# Altium footprint library Voltage_regulators.PcbLib: 4 footprints
Each footprint in its own frame and in the unit in brackets; x right, y up, seen from the top. Pads: shape width x height; smd on the part's side, far side on the other; paste and mask are expansions set on the pad; w line width, h text height; cw(c..) or ccw(c..) is an arc to the next point about the centre after c.
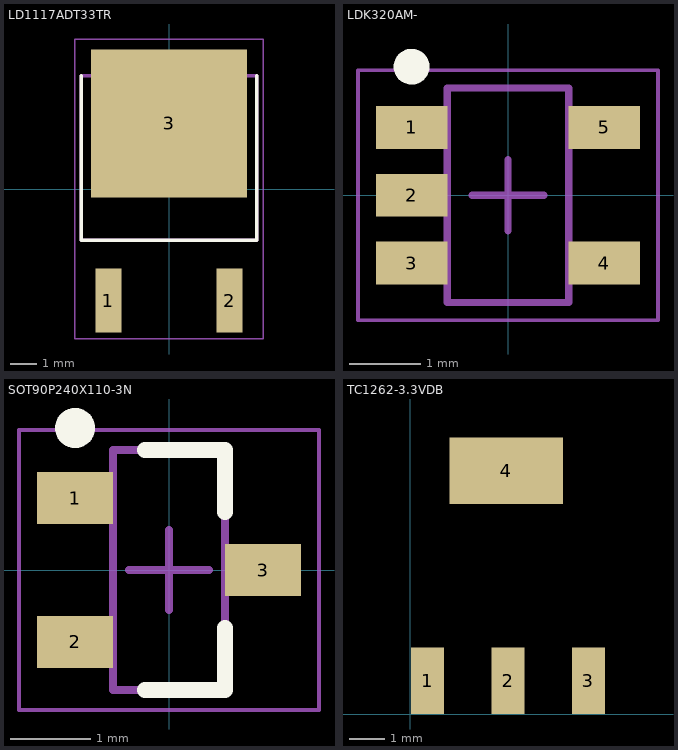
[diagram p0: the footprints below, top view; thin cyan lines are the x and y axes]

## LD1117ADT33TR [mm] "IC: voltage regulator; LDO,linear,fixed; 3.3V; 1A; DPAK; SMD; ±4%"
pads (3):
  rect 0.98x2.4 smd: 1(-2.28,-4.2) 2(2.28,-4.2)
  rect 5.86x5.57 smd paste-4: 3(0,2.47)
Top Overlay:
  lines w0.127: -3.3,4.27 -3.3,-1.93 3.3,-1.93 3.3,4.27
  text ".DESIGNATOR" at -3.602,5.857 h1
Mechanical 13:
  lines w0.127: -3.3,-1.93 3.3,-1.93 3.3,4.27 -3.3,4.27 -3.3,-1.93
Mechanical 15:
  lines w0.05: -3.55,-5.65 -3.55,5.65 3.55,5.65 3.55,-5.65 -3.55,-5.65
3D body "step_temp.STEP": height 2.17, standoff -0.23, extent -3.25,-4.743 3.25,4.982

## LDK320AM- [mm] "IC: voltage regulator; LDO,linear,adjustable; 1.2÷12V; 0.2A; SMD"
height 1.25
pads (5):
  rect 1x0.6 smd: 1(-1.35,0.95) 2(-1.35,0) 3(-1.35,-0.95) 4(1.35,-0.95) 5(1.35,0.95)
Top Overlay:
  circle w0.25: c-1.35,1.8 r0.125
  text ".DESIGNATOR" at -0.808,1.92 h1
Mechanical 13:
  lines w0.1: -0.85,-1.5 0.85,-1.5 0.85,1.5 -0.85,1.5 -0.85,-1.5
Mechanical 15:
  lines w0.05: -2.1,-1.75 2.1,-1.75 2.1,1.75 -2.1,1.75 -2.1,-1.75
  lines w0.1: -0.5,0 0.5,0 ; 0,-0.5 0,0.5
3D body "LDK320AM-.step": height 1.25, standoff 0, extent -1.6,-1.5 1.6,1.5

## SOT90P240X110-3N [mm] "SOT23, 3-Leads, Body 2,90x2,40mm, Pitch 0,90mm, IPC Medium Density"
height 1.1
pads (3):
  rect 0.95x0.65 smd: 1(-1.175,0.9) 2(-1.175,-0.9) 3(1.175,0)
Top Overlay:
  circle w0.25: c-1.175,1.775 r0.125
  lines w0.2: -0.3,-1.5 0.7,-1.5 0.7,-0.725 ; -0.3,1.5 0.7,1.5 0.7,0.725
  text ".DESIGNATOR" at -0.76,1.854 h1
Mechanical 13:
  lines w0.1: -0.7,-1.5 -0.7,1.5 0.7,1.5 0.7,-1.5 -0.7,-1.5
Mechanical 15:
  lines w0.05: -1.875,-1.75 -1.875,1.75 1.875,1.75 1.875,-1.75 -1.875,-1.75
  lines w0.1: -0.5,0 0.5,0 ; 0,-0.5 0,0.5
3D body "SOT90P240X110-3N.step": height 1.1, standoff 0, extent -1.25,-1.5 1.25,1.5

## TC1262-3.3VDB [mm]
pads (4):
  rect 0.95x1.9 smd: 1(0.5,0.95) 2(2.8,0.95) 3(5.1,0.95)
  rect 3.25x1.9 smd: 4(2.75,6.95)
Top Overlay:
  text ".DESIGNATOR" at 6.492,7.158 h1
3D body "step_temp.STEP": height 1.8, standoff 0, extent -0.456,0.184 6.044,7.182